# Altium footprint library Package_DFN_QFN.PcbLib: 735 footprints (part 37 of 46)
Each footprint in its own frame and in the unit in brackets; x right, y up, seen from the top. Pads: shape width x height; smd on the part's side, far side on the other; paste and mask are expansions set on the pad; w line width, h text height; cw(c..) or ccw(c..) is an arc to the next point about the centre after c.
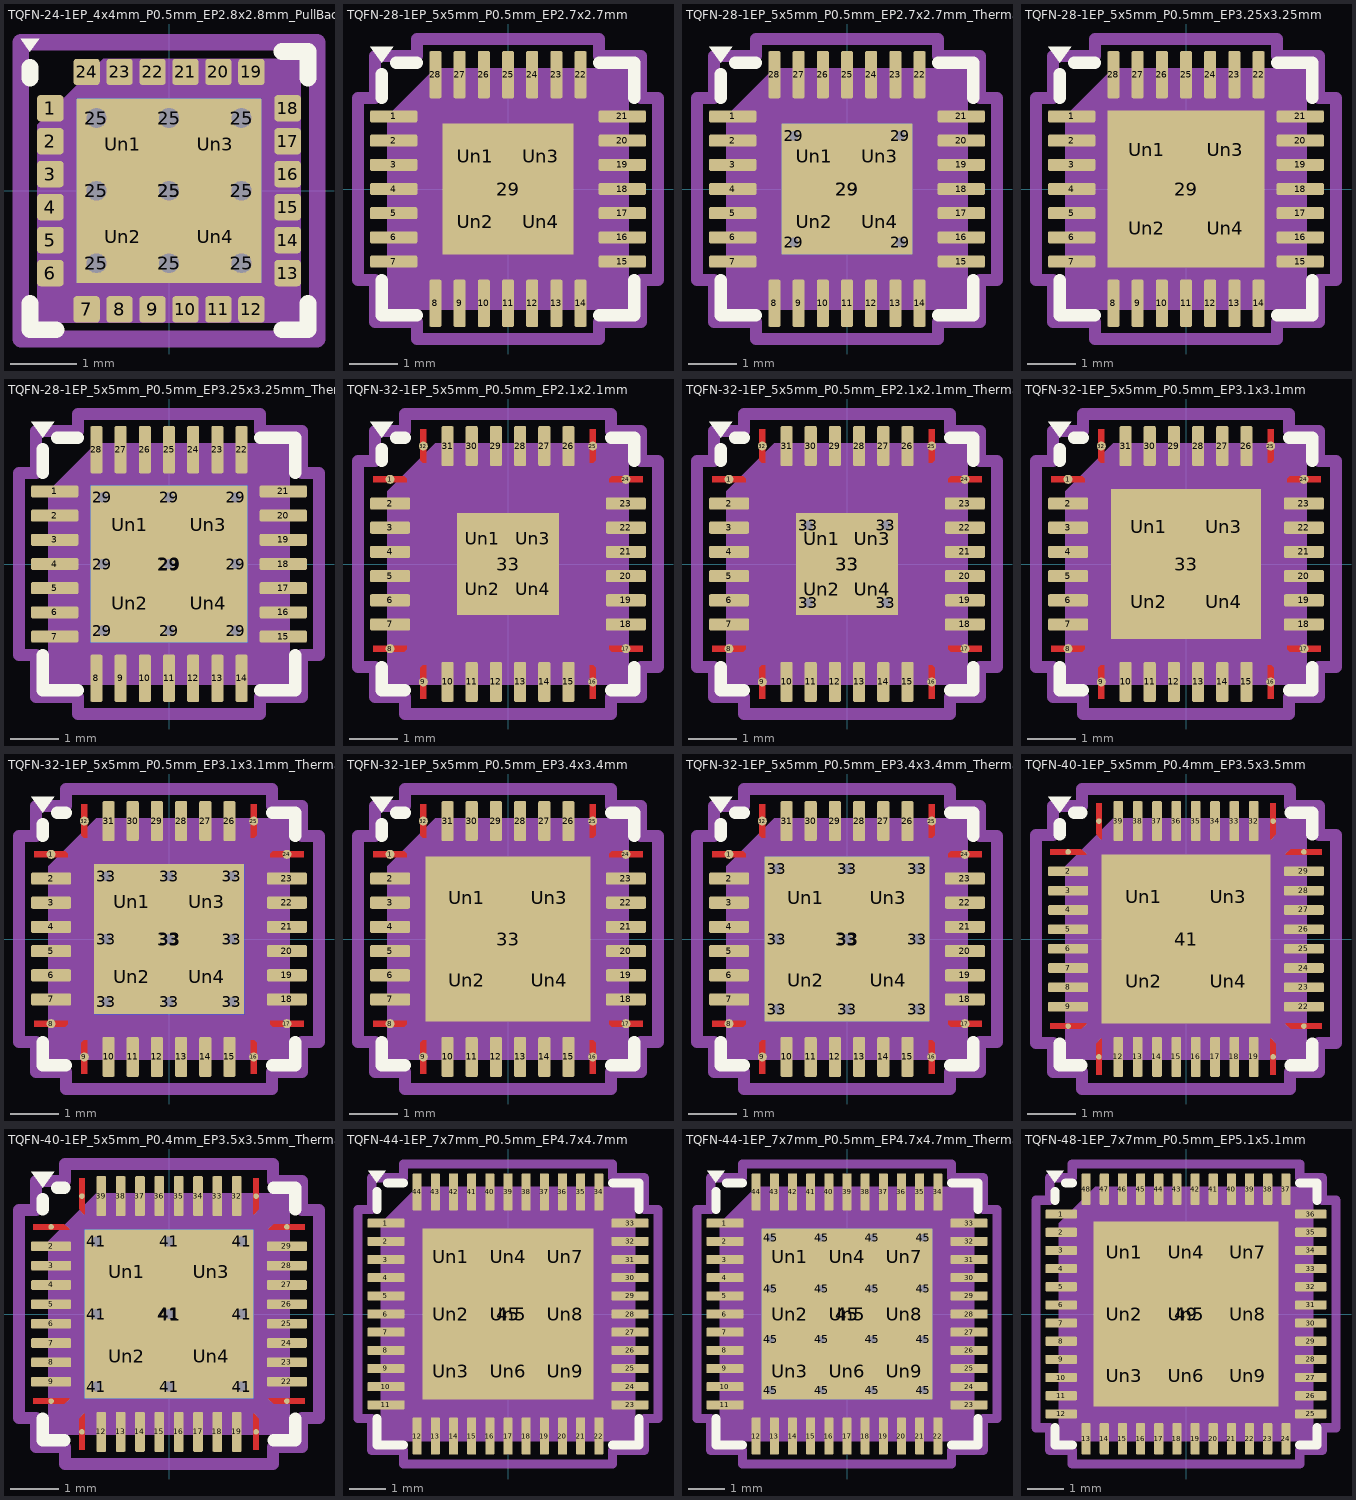
[diagram p36: the footprints below, top view; thin cyan lines are the x and y axes]

## TQFN-24-1EP_4x4mm_P0.5mm_EP2.8x2.8mm_PullBack_ThermalVias [mm] "TQFN-24-1EP_4x4mm_P0.5mm_EP2.8x2.8mm_PullBack_ThermalVias"
pads (39):
  rrect25% 0.4x0.4 smd: 1(-1.8,1.25) 2(-1.8,0.75) 3(-1.8,0.25) 4(-1.8,-0.25) 5(-1.8,-0.75) 6(-1.8,-1.25) 7(-1.25,-1.8) 8(-0.75,-1.8) 9(-0.25,-1.8) 10(0.25,-1.8) 11(0.75,-1.8) 12(1.25,-1.8) 13(1.8,-1.25) 14(1.8,-0.75) 15(1.8,-0.25) 16(1.8,0.25) 17(1.8,0.75) 18(1.8,1.25) 19(1.25,1.8) 20(0.75,1.8) 21(0.25,1.8) 22(-0.25,1.8) 23(-0.75,1.8) 24(-1.25,1.8)
  round 0.6 hole 0.3: 25(-1.1,-1.1) 25(-1.1,0) 25(-1.1,1.1) 25(0,-1.1) 25(0,0) 25(0,1.1) 25(1.1,-1.1) 25(1.1,0) 25(1.1,1.1)
  rect 2.8x2.8 smd: 25(0,0)
  rect 2.8x2.8 smd far side: 25(0,0)
  rrect22% 1.13x1.13 on Top Paste: Un1(-0.7,0.7) Un2(-0.7,-0.7) Un3(0.7,0.7) Un4(0.7,-0.7)
F.SilkS:
  region: -2.11,2.11 -2.25,2.3 -1.97,2.3
  lines w0.254: -2.11,-1.71 -2.11,-2.11 -1.71,-2.11 ; -2.11,1.71 -2.11,1.87 ; 1.71,-2.11 2.11,-2.11 2.11,-1.71 ; 1.71,2.11 2.11,2.11 2.11,1.71
Top Component Center:
  lines w0.127: -0.127,0 0.127,0 -0.127,0 ; 0,-0.127 0,0.127 0,-0.127
Top Assembly:
  region: 2,-2 -2,-2 -2,1 -1,2 2,2
Top Courtyard:
  lines w0.254: -2.25,-2.25 2.25,-2.25 2.25,2.25 -2.25,2.25 -2.25,-2.25
Top Designator:
  text ".Designator" at -3.43,-0.344 h1.52

## TQFN-28-1EP_5x5mm_P0.5mm_EP2.7x2.7mm [mm] "TQFN-28-1EP_5x5mm_P0.5mm_EP2.7x2.7mm"
pads (33):
  rrect25% 0.975x0.25 smd: 1(-2.362,1.5) 2(-2.362,1) 3(-2.362,0.5) 4(-2.362,0) 5(-2.362,-0.5) 6(-2.362,-1) 7(-2.362,-1.5) 15(2.362,-1.5) 16(2.362,-1) 17(2.362,-0.5) 18(2.362,0) 19(2.362,0.5) 20(2.362,1) 21(2.362,1.5)
  rrect25% 0.25x0.975 smd: 8(-1.5,-2.362) 9(-1,-2.362) 10(-0.5,-2.362) 11(0,-2.362) 12(0.5,-2.362) 13(1,-2.362) 14(1.5,-2.362) 22(1.5,2.362) 23(1,2.362) 24(0.5,2.362) 25(0,2.362) 26(-0.5,2.362) 27(-1,2.362) 28(-1.5,2.362)
  rect 2.7x2.7 smd: 29(0,0)
  rrect23% 1.09x1.09 on Top Paste: Un1(-0.675,0.675) Un2(-0.675,-0.675) Un3(0.675,0.675) Un4(0.675,-0.675)
F.SilkS:
  region: -2.61,2.61 -2.85,2.94 -2.37,2.94
  lines w0.254: -2.61,-1.885 -2.61,-2.61 -1.885,-2.61 ; -2.61,1.885 -2.61,2.37 ; -2.31,2.61 -1.885,2.61 ; 1.885,-2.61 2.61,-2.61 2.61,-1.885 ; 1.885,2.61 2.61,2.61 2.61,1.885
Top Component Center:
  lines w0.127: -0.127,0 0.127,0 -0.127,0 ; 0,-0.127 0,0.127 0,-0.127
Top Assembly:
  region: 2.5,-2.5 -2.5,-2.5 -2.5,1.5 -1.5,2.5 2.5,2.5
Top Courtyard:
  lines w0.254: -3.1,-1.88 -2.75,-1.88 -2.75,-2.75 -1.88,-2.75 -1.88,-3.1 1.88,-3.1 1.88,-2.75 2.75,-2.75 2.75,-1.88 3.1,-1.88 3.1,1.88 2.75,1.88 2.75,2.75 1.88,2.75 1.88,3.1 -1.88,3.1 -1.88,2.75 -2.75,2.75 -2.75,1.88 -3.1,1.88 -3.1,-1.88
Top Designator:
  text ".Designator" at -3.43,-0.344 h1.52

## TQFN-28-1EP_5x5mm_P0.5mm_EP2.7x2.7mm_ThermalVias [mm] "TQFN-28-1EP_5x5mm_P0.5mm_EP2.7x2.7mm_ThermalVias"
pads (38):
  rrect25% 0.975x0.25 smd: 1(-2.362,1.5) 2(-2.362,1) 3(-2.362,0.5) 4(-2.362,0) 5(-2.362,-0.5) 6(-2.362,-1) 7(-2.362,-1.5) 15(2.362,-1.5) 16(2.362,-1) 17(2.362,-0.5) 18(2.362,0) 19(2.362,0.5) 20(2.362,1) 21(2.362,1.5)
  rrect25% 0.25x0.975 smd: 8(-1.5,-2.362) 9(-1,-2.362) 10(-0.5,-2.362) 11(0,-2.362) 12(0.5,-2.362) 13(1,-2.362) 14(1.5,-2.362) 22(1.5,2.362) 23(1,2.362) 24(0.5,2.362) 25(0,2.362) 26(-0.5,2.362) 27(-1,2.362) 28(-1.5,2.362)
  round 0.5 hole 0.2: 29(-1.1,-1.1) 29(-1.1,1.1) 29(1.1,-1.1) 29(1.1,1.1)
  rect 2.7x2.7 smd: 29(0,0)
  rect 2.7x2.7 smd far side: 29(0,0)
  rrect21% 1.17x1.17 on Top Paste: Un1(-0.675,0.675) Un2(-0.675,-0.675) Un3(0.675,0.675) Un4(0.675,-0.675)
F.SilkS:
  region: -2.61,2.61 -2.85,2.94 -2.37,2.94
  lines w0.254: -2.61,-1.885 -2.61,-2.61 -1.885,-2.61 ; -2.61,1.885 -2.61,2.37 ; -2.31,2.61 -1.885,2.61 ; 1.885,-2.61 2.61,-2.61 2.61,-1.885 ; 1.885,2.61 2.61,2.61 2.61,1.885
Top Component Center:
  lines w0.127: -0.127,0 0.127,0 -0.127,0 ; 0,-0.127 0,0.127 0,-0.127
Top Assembly:
  region: 2.5,-2.5 -2.5,-2.5 -2.5,1.5 -1.5,2.5 2.5,2.5
Top Courtyard:
  lines w0.254: -3.1,-1.88 -2.75,-1.88 -2.75,-2.75 -1.88,-2.75 -1.88,-3.1 1.88,-3.1 1.88,-2.75 2.75,-2.75 2.75,-1.88 3.1,-1.88 3.1,1.88 2.75,1.88 2.75,2.75 1.88,2.75 1.88,3.1 -1.88,3.1 -1.88,2.75 -2.75,2.75 -2.75,1.88 -3.1,1.88 -3.1,-1.88
Top Designator:
  text ".Designator" at -3.43,-0.344 h1.52

## TQFN-28-1EP_5x5mm_P0.5mm_EP3.25x3.25mm [mm] "TQFN-28-1EP_5x5mm_P0.5mm_EP3.25x3.25mm"
pads (33):
  rrect25% 0.975x0.25 smd: 1(-2.362,1.5) 2(-2.362,1) 3(-2.362,0.5) 4(-2.362,0) 5(-2.362,-0.5) 6(-2.362,-1) 7(-2.362,-1.5) 15(2.362,-1.5) 16(2.362,-1) 17(2.362,-0.5) 18(2.362,0) 19(2.362,0.5) 20(2.362,1) 21(2.362,1.5)
  rrect25% 0.25x0.975 smd: 8(-1.5,-2.362) 9(-1,-2.362) 10(-0.5,-2.362) 11(0,-2.362) 12(0.5,-2.362) 13(1,-2.362) 14(1.5,-2.362) 22(1.5,2.362) 23(1,2.362) 24(0.5,2.362) 25(0,2.362) 26(-0.5,2.362) 27(-1,2.362) 28(-1.5,2.362)
  rect 3.25x3.25 smd: 29(0,0)
  rrect19% 1.31x1.31 on Top Paste: Un1(-0.81,0.81) Un2(-0.81,-0.81) Un3(0.81,0.81) Un4(0.81,-0.81)
F.SilkS:
  region: -2.61,2.61 -2.85,2.94 -2.37,2.94
  lines w0.254: -2.61,-1.885 -2.61,-2.61 -1.885,-2.61 ; -2.61,1.885 -2.61,2.37 ; -2.31,2.61 -1.885,2.61 ; 1.885,-2.61 2.61,-2.61 2.61,-1.885 ; 1.885,2.61 2.61,2.61 2.61,1.885
Top Component Center:
  lines w0.127: -0.127,0 0.127,0 -0.127,0 ; 0,-0.127 0,0.127 0,-0.127
Top Assembly:
  region: 2.5,-2.5 -2.5,-2.5 -2.5,1.5 -1.5,2.5 2.5,2.5
Top Courtyard:
  lines w0.254: -3.1,-1.88 -2.75,-1.88 -2.75,-2.75 -1.88,-2.75 -1.88,-3.1 1.88,-3.1 1.88,-2.75 2.75,-2.75 2.75,-1.88 3.1,-1.88 3.1,1.88 2.75,1.88 2.75,2.75 1.88,2.75 1.88,3.1 -1.88,3.1 -1.88,2.75 -2.75,2.75 -2.75,1.88 -3.1,1.88 -3.1,-1.88
Top Designator:
  text ".Designator" at -3.43,-0.344 h1.52

## TQFN-28-1EP_5x5mm_P0.5mm_EP3.25x3.25mm_ThermalVias [mm] "TQFN-28-1EP_5x5mm_P0.5mm_EP3.25x3.25mm_ThermalVias"
pads (43):
  rrect25% 0.975x0.25 smd: 1(-2.362,1.5) 2(-2.362,1) 3(-2.362,0.5) 4(-2.362,0) 5(-2.362,-0.5) 6(-2.362,-1) 7(-2.362,-1.5) 15(2.362,-1.5) 16(2.362,-1) 17(2.362,-0.5) 18(2.362,0) 19(2.362,0.5) 20(2.362,1) 21(2.362,1.5)
  rrect25% 0.25x0.975 smd: 8(-1.5,-2.362) 9(-1,-2.362) 10(-0.5,-2.362) 11(0,-2.362) 12(0.5,-2.362) 13(1,-2.362) 14(1.5,-2.362) 22(1.5,2.362) 23(1,2.362) 24(0.5,2.362) 25(0,2.362) 26(-0.5,2.362) 27(-1,2.362) 28(-1.5,2.362)
  round 0.5 hole 0.2: 29(-1.375,-1.375) 29(-1.375,0) 29(-1.375,1.375) 29(0,-1.375) 29(0,0) 29(0,1.375) 29(1.375,-1.375) 29(1.375,0) 29(1.375,1.375)
  rect 3.25x3.25 smd: 29(0,0)
  rect 3.25x3.25 smd far side: 29(0,0)
  rrect18% 1.41x1.41 on Top Paste: Un1(-0.81,0.81) Un2(-0.81,-0.81) Un3(0.81,0.81) Un4(0.81,-0.81)
F.SilkS:
  region: -2.61,2.61 -2.85,2.94 -2.37,2.94
  lines w0.254: -2.61,-1.885 -2.61,-2.61 -1.885,-2.61 ; -2.61,1.885 -2.61,2.37 ; -2.31,2.61 -1.885,2.61 ; 1.885,-2.61 2.61,-2.61 2.61,-1.885 ; 1.885,2.61 2.61,2.61 2.61,1.885
Top Component Center:
  lines w0.127: -0.127,0 0.127,0 -0.127,0 ; 0,-0.127 0,0.127 0,-0.127
Top Assembly:
  region: 2.5,-2.5 -2.5,-2.5 -2.5,1.5 -1.5,2.5 2.5,2.5
Top Courtyard:
  lines w0.254: -3.1,-1.88 -2.75,-1.88 -2.75,-2.75 -1.88,-2.75 -1.88,-3.1 1.88,-3.1 1.88,-2.75 2.75,-2.75 2.75,-1.88 3.1,-1.88 3.1,1.88 2.75,1.88 2.75,2.75 1.88,2.75 1.88,3.1 -1.88,3.1 -1.88,2.75 -2.75,2.75 -2.75,1.88 -3.1,1.88 -3.1,-1.88
Top Designator:
  text ".Designator" at -3.43,-0.344 h1.52

## TQFN-32-1EP_5x5mm_P0.5mm_EP2.1x2.1mm [mm] "TQFN-32-1EP_5x5mm_P0.5mm_EP2.1x2.1mm"
pads (37):
  round 0.186 smd: 1(-2.438,1.75) 8(-2.438,-1.75) 9(-1.75,-2.438) 16(1.75,-2.438) 17(2.438,-1.75) 24(2.438,1.75) 25(1.75,2.438) 32(-1.75,2.438)
  rrect25% 0.825x0.25 smd: 2(-2.438,1.25) 3(-2.438,0.75) 4(-2.438,0.25) 5(-2.438,-0.25) 6(-2.438,-0.75) 7(-2.438,-1.25) 18(2.438,-1.25) 19(2.438,-0.75) 20(2.438,-0.25) 21(2.438,0.25) 22(2.438,0.75) 23(2.438,1.25)
  rrect25% 0.25x0.825 smd: 10(-1.25,-2.438) 11(-0.75,-2.438) 12(-0.25,-2.438) 13(0.25,-2.438) 14(0.75,-2.438) 15(1.25,-2.438) 26(1.25,2.438) 27(0.75,2.438) 28(0.25,2.438) 29(-0.25,2.438) 30(-0.75,2.438) 31(-1.25,2.438)
  rect 2.1x2.1 smd: 33(0,0)
  rrect25% 0.85x0.85 on Top Paste: Un1(-0.525,0.525) Un2(-0.525,-0.525) Un3(0.525,0.525) Un4(0.525,-0.525)
F.Cu:
  region: -1.687,2.088 -1.759,2.088 -1.812,2.141 -1.812,2.788 -1.687,2.788
  region: 1.812,2.141 1.759,2.088 1.687,2.088 1.687,2.788 1.812,2.788
  region: 2.788,1.687 2.088,1.687 2.088,1.759 2.141,1.812 2.788,1.812
  region: 2.788,-1.812 2.141,-1.812 2.088,-1.759 2.088,-1.687 2.788,-1.687
  region: 1.812,-2.141 1.812,-2.788 1.687,-2.788 1.687,-2.088 1.759,-2.088
  region: -1.687,-2.788 -1.812,-2.788 -1.812,-2.141 -1.759,-2.088 -1.687,-2.088
  region: -2.088,-1.759 -2.141,-1.812 -2.788,-1.812 -2.788,-1.687 -2.088,-1.687
  region: -2.088,1.759 -2.088,1.687 -2.788,1.687 -2.788,1.812 -2.141,1.812
F.SilkS:
  region: -2.61,2.61 -2.85,2.94 -2.37,2.94
  lines w0.254: -2.61,-2.135 -2.61,-2.61 -2.135,-2.61 ; -2.61,2.135 -2.61,2.37 ; -2.31,2.61 -2.135,2.61 ; 2.135,-2.61 2.61,-2.61 2.61,-2.135 ; 2.135,2.61 2.61,2.61 2.61,2.135
F.Paste:
  region: -1.687,2.088 -1.759,2.088 -1.812,2.141 -1.812,2.788 -1.687,2.788
  region: 1.812,2.141 1.759,2.088 1.687,2.088 1.687,2.788 1.812,2.788
  region: 2.788,1.687 2.088,1.687 2.088,1.759 2.141,1.812 2.788,1.812
  region: 2.788,-1.812 2.141,-1.812 2.088,-1.759 2.088,-1.687 2.788,-1.687
  region: 1.812,-2.141 1.812,-2.788 1.687,-2.788 1.687,-2.088 1.759,-2.088
  region: -1.687,-2.788 -1.812,-2.788 -1.812,-2.141 -1.759,-2.088 -1.687,-2.088
  region: -2.088,-1.759 -2.141,-1.812 -2.788,-1.812 -2.788,-1.687 -2.088,-1.687
  region: -2.088,1.759 -2.088,1.687 -2.788,1.687 -2.788,1.812 -2.141,1.812
F.Mask:
  region: -1.687,2.088 -1.759,2.088 -1.812,2.141 -1.812,2.788 -1.687,2.788
  region: 1.812,2.141 1.759,2.088 1.687,2.088 1.687,2.788 1.812,2.788
  region: 2.788,1.687 2.088,1.687 2.088,1.759 2.141,1.812 2.788,1.812
  region: 2.788,-1.812 2.141,-1.812 2.088,-1.759 2.088,-1.687 2.788,-1.687
  region: 1.812,-2.141 1.812,-2.788 1.687,-2.788 1.687,-2.088 1.759,-2.088
  region: -1.687,-2.788 -1.812,-2.788 -1.812,-2.141 -1.759,-2.088 -1.687,-2.088
  region: -2.088,-1.759 -2.141,-1.812 -2.788,-1.812 -2.788,-1.687 -2.088,-1.687
  region: -2.088,1.759 -2.088,1.687 -2.788,1.687 -2.788,1.812 -2.141,1.812
Top Component Center:
  lines w0.127: -0.127,0 0.127,0 -0.127,0 ; 0,-0.127 0,0.127 0,-0.127
Top Assembly:
  region: 2.5,-2.5 -2.5,-2.5 -2.5,1.5 -1.5,2.5 2.5,2.5
Top Courtyard:
  lines w0.254: -3.1,-2.13 -2.75,-2.13 -2.75,-2.75 -2.13,-2.75 -2.13,-3.1 2.13,-3.1 2.13,-2.75 2.75,-2.75 2.75,-2.13 3.1,-2.13 3.1,2.13 2.75,2.13 2.75,2.75 2.13,2.75 2.13,3.1 -2.13,3.1 -2.13,2.75 -2.75,2.75 -2.75,2.13 -3.1,2.13 -3.1,-2.13
Top Designator:
  text ".Designator" at -3.43,-0.344 h1.52

## TQFN-32-1EP_5x5mm_P0.5mm_EP2.1x2.1mm_ThermalVias [mm] "TQFN-32-1EP_5x5mm_P0.5mm_EP2.1x2.1mm_ThermalVias"
pads (42):
  round 0.186 smd: 1(-2.438,1.75) 8(-2.438,-1.75) 9(-1.75,-2.438) 16(1.75,-2.438) 17(2.438,-1.75) 24(2.438,1.75) 25(1.75,2.438) 32(-1.75,2.438)
  rrect25% 0.825x0.25 smd: 2(-2.438,1.25) 3(-2.438,0.75) 4(-2.438,0.25) 5(-2.438,-0.25) 6(-2.438,-0.75) 7(-2.438,-1.25) 18(2.438,-1.25) 19(2.438,-0.75) 20(2.438,-0.25) 21(2.438,0.25) 22(2.438,0.75) 23(2.438,1.25)
  rrect25% 0.25x0.825 smd: 10(-1.25,-2.438) 11(-0.75,-2.438) 12(-0.25,-2.438) 13(0.25,-2.438) 14(0.75,-2.438) 15(1.25,-2.438) 26(1.25,2.438) 27(0.75,2.438) 28(0.25,2.438) 29(-0.25,2.438) 30(-0.75,2.438) 31(-1.25,2.438)
  round 0.5 hole 0.2: 33(-0.8,-0.8) 33(-0.8,0.8) 33(0.8,-0.8) 33(0.8,0.8)
  rect 2.1x2.1 smd: 33(0,0)
  rect 2.1x2.1 smd far side: 33(0,0)
  rrect25% 0.91x0.91 on Top Paste: Un1(-0.525,0.525) Un2(-0.525,-0.525) Un3(0.525,0.525) Un4(0.525,-0.525)
F.Cu:
  region: -1.687,2.088 -1.759,2.088 -1.812,2.141 -1.812,2.788 -1.687,2.788
  region: 1.812,2.141 1.759,2.088 1.687,2.088 1.687,2.788 1.812,2.788
  region: 2.788,1.687 2.088,1.687 2.088,1.759 2.141,1.812 2.788,1.812
  region: 2.788,-1.812 2.141,-1.812 2.088,-1.759 2.088,-1.687 2.788,-1.687
  region: 1.812,-2.141 1.812,-2.788 1.687,-2.788 1.687,-2.088 1.759,-2.088
  region: -1.687,-2.788 -1.812,-2.788 -1.812,-2.141 -1.759,-2.088 -1.687,-2.088
  region: -2.088,-1.759 -2.141,-1.812 -2.788,-1.812 -2.788,-1.687 -2.088,-1.687
  region: -2.088,1.759 -2.088,1.687 -2.788,1.687 -2.788,1.812 -2.141,1.812
F.SilkS:
  region: -2.61,2.61 -2.85,2.94 -2.37,2.94
  lines w0.254: -2.61,-2.135 -2.61,-2.61 -2.135,-2.61 ; -2.61,2.135 -2.61,2.37 ; -2.31,2.61 -2.135,2.61 ; 2.135,-2.61 2.61,-2.61 2.61,-2.135 ; 2.135,2.61 2.61,2.61 2.61,2.135
F.Paste:
  region: -1.687,2.088 -1.759,2.088 -1.812,2.141 -1.812,2.788 -1.687,2.788
  region: 1.812,2.141 1.759,2.088 1.687,2.088 1.687,2.788 1.812,2.788
  region: 2.788,1.687 2.088,1.687 2.088,1.759 2.141,1.812 2.788,1.812
  region: 2.788,-1.812 2.141,-1.812 2.088,-1.759 2.088,-1.687 2.788,-1.687
  region: 1.812,-2.141 1.812,-2.788 1.687,-2.788 1.687,-2.088 1.759,-2.088
  region: -1.687,-2.788 -1.812,-2.788 -1.812,-2.141 -1.759,-2.088 -1.687,-2.088
  region: -2.088,-1.759 -2.141,-1.812 -2.788,-1.812 -2.788,-1.687 -2.088,-1.687
  region: -2.088,1.759 -2.088,1.687 -2.788,1.687 -2.788,1.812 -2.141,1.812
F.Mask:
  region: -1.687,2.088 -1.759,2.088 -1.812,2.141 -1.812,2.788 -1.687,2.788
  region: 1.812,2.141 1.759,2.088 1.687,2.088 1.687,2.788 1.812,2.788
  region: 2.788,1.687 2.088,1.687 2.088,1.759 2.141,1.812 2.788,1.812
  region: 2.788,-1.812 2.141,-1.812 2.088,-1.759 2.088,-1.687 2.788,-1.687
  region: 1.812,-2.141 1.812,-2.788 1.687,-2.788 1.687,-2.088 1.759,-2.088
  region: -1.687,-2.788 -1.812,-2.788 -1.812,-2.141 -1.759,-2.088 -1.687,-2.088
  region: -2.088,-1.759 -2.141,-1.812 -2.788,-1.812 -2.788,-1.687 -2.088,-1.687
  region: -2.088,1.759 -2.088,1.687 -2.788,1.687 -2.788,1.812 -2.141,1.812
Top Component Center:
  lines w0.127: -0.127,0 0.127,0 -0.127,0 ; 0,-0.127 0,0.127 0,-0.127
Top Assembly:
  region: 2.5,-2.5 -2.5,-2.5 -2.5,1.5 -1.5,2.5 2.5,2.5
Top Courtyard:
  lines w0.254: -3.1,-2.13 -2.75,-2.13 -2.75,-2.75 -2.13,-2.75 -2.13,-3.1 2.13,-3.1 2.13,-2.75 2.75,-2.75 2.75,-2.13 3.1,-2.13 3.1,2.13 2.75,2.13 2.75,2.75 2.13,2.75 2.13,3.1 -2.13,3.1 -2.13,2.75 -2.75,2.75 -2.75,2.13 -3.1,2.13 -3.1,-2.13
Top Designator:
  text ".Designator" at -3.43,-0.344 h1.52

## TQFN-32-1EP_5x5mm_P0.5mm_EP3.1x3.1mm [mm] "TQFN-32-1EP_5x5mm_P0.5mm_EP3.1x3.1mm"
pads (37):
  round 0.186 smd: 1(-2.438,1.75) 8(-2.438,-1.75) 9(-1.75,-2.438) 16(1.75,-2.438) 17(2.438,-1.75) 24(2.438,1.75) 25(1.75,2.438) 32(-1.75,2.438)
  rrect25% 0.825x0.25 smd: 2(-2.438,1.25) 3(-2.438,0.75) 4(-2.438,0.25) 5(-2.438,-0.25) 6(-2.438,-0.75) 7(-2.438,-1.25) 18(2.438,-1.25) 19(2.438,-0.75) 20(2.438,-0.25) 21(2.438,0.25) 22(2.438,0.75) 23(2.438,1.25)
  rrect25% 0.25x0.825 smd: 10(-1.25,-2.438) 11(-0.75,-2.438) 12(-0.25,-2.438) 13(0.25,-2.438) 14(0.75,-2.438) 15(1.25,-2.438) 26(1.25,2.438) 27(0.75,2.438) 28(0.25,2.438) 29(-0.25,2.438) 30(-0.75,2.438) 31(-1.25,2.438)
  rect 3.1x3.1 smd: 33(0,0)
  rrect20% 1.25x1.25 on Top Paste: Un1(-0.775,0.775) Un2(-0.775,-0.775) Un3(0.775,0.775) Un4(0.775,-0.775)
F.Cu:
  region: -1.687,2.088 -1.759,2.088 -1.812,2.141 -1.812,2.788 -1.687,2.788
  region: 1.812,2.141 1.759,2.088 1.687,2.088 1.687,2.788 1.812,2.788
  region: 2.788,1.687 2.088,1.687 2.088,1.759 2.141,1.812 2.788,1.812
  region: 2.788,-1.812 2.141,-1.812 2.088,-1.759 2.088,-1.687 2.788,-1.687
  region: 1.812,-2.141 1.812,-2.788 1.687,-2.788 1.687,-2.088 1.759,-2.088
  region: -1.687,-2.788 -1.812,-2.788 -1.812,-2.141 -1.759,-2.088 -1.687,-2.088
  region: -2.088,-1.759 -2.141,-1.812 -2.788,-1.812 -2.788,-1.687 -2.088,-1.687
  region: -2.088,1.759 -2.088,1.687 -2.788,1.687 -2.788,1.812 -2.141,1.812
F.SilkS:
  region: -2.61,2.61 -2.85,2.94 -2.37,2.94
  lines w0.254: -2.61,-2.135 -2.61,-2.61 -2.135,-2.61 ; -2.61,2.135 -2.61,2.37 ; -2.31,2.61 -2.135,2.61 ; 2.135,-2.61 2.61,-2.61 2.61,-2.135 ; 2.135,2.61 2.61,2.61 2.61,2.135
F.Paste:
  region: -1.687,2.088 -1.759,2.088 -1.812,2.141 -1.812,2.788 -1.687,2.788
  region: 1.812,2.141 1.759,2.088 1.687,2.088 1.687,2.788 1.812,2.788
  region: 2.788,1.687 2.088,1.687 2.088,1.759 2.141,1.812 2.788,1.812
  region: 2.788,-1.812 2.141,-1.812 2.088,-1.759 2.088,-1.687 2.788,-1.687
  region: 1.812,-2.141 1.812,-2.788 1.687,-2.788 1.687,-2.088 1.759,-2.088
  region: -1.687,-2.788 -1.812,-2.788 -1.812,-2.141 -1.759,-2.088 -1.687,-2.088
  region: -2.088,-1.759 -2.141,-1.812 -2.788,-1.812 -2.788,-1.687 -2.088,-1.687
  region: -2.088,1.759 -2.088,1.687 -2.788,1.687 -2.788,1.812 -2.141,1.812
F.Mask:
  region: -1.687,2.088 -1.759,2.088 -1.812,2.141 -1.812,2.788 -1.687,2.788
  region: 1.812,2.141 1.759,2.088 1.687,2.088 1.687,2.788 1.812,2.788
  region: 2.788,1.687 2.088,1.687 2.088,1.759 2.141,1.812 2.788,1.812
  region: 2.788,-1.812 2.141,-1.812 2.088,-1.759 2.088,-1.687 2.788,-1.687
  region: 1.812,-2.141 1.812,-2.788 1.687,-2.788 1.687,-2.088 1.759,-2.088
  region: -1.687,-2.788 -1.812,-2.788 -1.812,-2.141 -1.759,-2.088 -1.687,-2.088
  region: -2.088,-1.759 -2.141,-1.812 -2.788,-1.812 -2.788,-1.687 -2.088,-1.687
  region: -2.088,1.759 -2.088,1.687 -2.788,1.687 -2.788,1.812 -2.141,1.812
Top Component Center:
  lines w0.127: -0.127,0 0.127,0 -0.127,0 ; 0,-0.127 0,0.127 0,-0.127
Top Assembly:
  region: 2.5,-2.5 -2.5,-2.5 -2.5,1.5 -1.5,2.5 2.5,2.5
Top Courtyard:
  lines w0.254: -3.1,-2.13 -2.75,-2.13 -2.75,-2.75 -2.13,-2.75 -2.13,-3.1 2.13,-3.1 2.13,-2.75 2.75,-2.75 2.75,-2.13 3.1,-2.13 3.1,2.13 2.75,2.13 2.75,2.75 2.13,2.75 2.13,3.1 -2.13,3.1 -2.13,2.75 -2.75,2.75 -2.75,2.13 -3.1,2.13 -3.1,-2.13
Top Designator:
  text ".Designator" at -3.43,-0.344 h1.52

## TQFN-32-1EP_5x5mm_P0.5mm_EP3.1x3.1mm_ThermalVias [mm] "TQFN-32-1EP_5x5mm_P0.5mm_EP3.1x3.1mm_ThermalVias"
pads (47):
  round 0.186 smd: 1(-2.438,1.75) 8(-2.438,-1.75) 9(-1.75,-2.438) 16(1.75,-2.438) 17(2.438,-1.75) 24(2.438,1.75) 25(1.75,2.438) 32(-1.75,2.438)
  rrect25% 0.825x0.25 smd: 2(-2.438,1.25) 3(-2.438,0.75) 4(-2.438,0.25) 5(-2.438,-0.25) 6(-2.438,-0.75) 7(-2.438,-1.25) 18(2.438,-1.25) 19(2.438,-0.75) 20(2.438,-0.25) 21(2.438,0.25) 22(2.438,0.75) 23(2.438,1.25)
  rrect25% 0.25x0.825 smd: 10(-1.25,-2.438) 11(-0.75,-2.438) 12(-0.25,-2.438) 13(0.25,-2.438) 14(0.75,-2.438) 15(1.25,-2.438) 26(1.25,2.438) 27(0.75,2.438) 28(0.25,2.438) 29(-0.25,2.438) 30(-0.75,2.438) 31(-1.25,2.438)
  round 0.5 hole 0.2: 33(-1.3,-1.3) 33(-1.3,0) 33(-1.3,1.3) 33(0,-1.3) 33(0,0) 33(0,1.3) 33(1.3,-1.3) 33(1.3,0) 33(1.3,1.3)
  rect 3.1x3.1 smd: 33(0,0)
  rect 3.1x3.1 smd far side: 33(0,0)
  rrect19% 1.34x1.34 on Top Paste: Un1(-0.775,0.775) Un2(-0.775,-0.775) Un3(0.775,0.775) Un4(0.775,-0.775)
F.Cu:
  region: -1.687,2.088 -1.759,2.088 -1.812,2.141 -1.812,2.788 -1.687,2.788
  region: 1.812,2.141 1.759,2.088 1.687,2.088 1.687,2.788 1.812,2.788
  region: 2.788,1.687 2.088,1.687 2.088,1.759 2.141,1.812 2.788,1.812
  region: 2.788,-1.812 2.141,-1.812 2.088,-1.759 2.088,-1.687 2.788,-1.687
  region: 1.812,-2.141 1.812,-2.788 1.687,-2.788 1.687,-2.088 1.759,-2.088
  region: -1.687,-2.788 -1.812,-2.788 -1.812,-2.141 -1.759,-2.088 -1.687,-2.088
  region: -2.088,-1.759 -2.141,-1.812 -2.788,-1.812 -2.788,-1.687 -2.088,-1.687
  region: -2.088,1.759 -2.088,1.687 -2.788,1.687 -2.788,1.812 -2.141,1.812
F.SilkS:
  region: -2.61,2.61 -2.85,2.94 -2.37,2.94
  lines w0.254: -2.61,-2.135 -2.61,-2.61 -2.135,-2.61 ; -2.61,2.135 -2.61,2.37 ; -2.31,2.61 -2.135,2.61 ; 2.135,-2.61 2.61,-2.61 2.61,-2.135 ; 2.135,2.61 2.61,2.61 2.61,2.135
F.Paste:
  region: -1.687,2.088 -1.759,2.088 -1.812,2.141 -1.812,2.788 -1.687,2.788
  region: 1.812,2.141 1.759,2.088 1.687,2.088 1.687,2.788 1.812,2.788
  region: 2.788,1.687 2.088,1.687 2.088,1.759 2.141,1.812 2.788,1.812
  region: 2.788,-1.812 2.141,-1.812 2.088,-1.759 2.088,-1.687 2.788,-1.687
  region: 1.812,-2.141 1.812,-2.788 1.687,-2.788 1.687,-2.088 1.759,-2.088
  region: -1.687,-2.788 -1.812,-2.788 -1.812,-2.141 -1.759,-2.088 -1.687,-2.088
  region: -2.088,-1.759 -2.141,-1.812 -2.788,-1.812 -2.788,-1.687 -2.088,-1.687
  region: -2.088,1.759 -2.088,1.687 -2.788,1.687 -2.788,1.812 -2.141,1.812
F.Mask:
  region: -1.687,2.088 -1.759,2.088 -1.812,2.141 -1.812,2.788 -1.687,2.788
  region: 1.812,2.141 1.759,2.088 1.687,2.088 1.687,2.788 1.812,2.788
  region: 2.788,1.687 2.088,1.687 2.088,1.759 2.141,1.812 2.788,1.812
  region: 2.788,-1.812 2.141,-1.812 2.088,-1.759 2.088,-1.687 2.788,-1.687
  region: 1.812,-2.141 1.812,-2.788 1.687,-2.788 1.687,-2.088 1.759,-2.088
  region: -1.687,-2.788 -1.812,-2.788 -1.812,-2.141 -1.759,-2.088 -1.687,-2.088
  region: -2.088,-1.759 -2.141,-1.812 -2.788,-1.812 -2.788,-1.687 -2.088,-1.687
  region: -2.088,1.759 -2.088,1.687 -2.788,1.687 -2.788,1.812 -2.141,1.812
Top Component Center:
  lines w0.127: -0.127,0 0.127,0 -0.127,0 ; 0,-0.127 0,0.127 0,-0.127
Top Assembly:
  region: 2.5,-2.5 -2.5,-2.5 -2.5,1.5 -1.5,2.5 2.5,2.5
Top Courtyard:
  lines w0.254: -3.1,-2.13 -2.75,-2.13 -2.75,-2.75 -2.13,-2.75 -2.13,-3.1 2.13,-3.1 2.13,-2.75 2.75,-2.75 2.75,-2.13 3.1,-2.13 3.1,2.13 2.75,2.13 2.75,2.75 2.13,2.75 2.13,3.1 -2.13,3.1 -2.13,2.75 -2.75,2.75 -2.75,2.13 -3.1,2.13 -3.1,-2.13
Top Designator:
  text ".Designator" at -3.43,-0.344 h1.52

## TQFN-32-1EP_5x5mm_P0.5mm_EP3.4x3.4mm [mm] "TQFN-32-1EP_5x5mm_P0.5mm_EP3.4x3.4mm"
pads (37):
  round 0.186 smd: 1(-2.438,1.75) 8(-2.438,-1.75) 9(-1.75,-2.438) 16(1.75,-2.438) 17(2.438,-1.75) 24(2.438,1.75) 25(1.75,2.438) 32(-1.75,2.438)
  rrect25% 0.825x0.25 smd: 2(-2.438,1.25) 3(-2.438,0.75) 4(-2.438,0.25) 5(-2.438,-0.25) 6(-2.438,-0.75) 7(-2.438,-1.25) 18(2.438,-1.25) 19(2.438,-0.75) 20(2.438,-0.25) 21(2.438,0.25) 22(2.438,0.75) 23(2.438,1.25)
  rrect25% 0.25x0.825 smd: 10(-1.25,-2.438) 11(-0.75,-2.438) 12(-0.25,-2.438) 13(0.25,-2.438) 14(0.75,-2.438) 15(1.25,-2.438) 26(1.25,2.438) 27(0.75,2.438) 28(0.25,2.438) 29(-0.25,2.438) 30(-0.75,2.438) 31(-1.25,2.438)
  rect 3.4x3.4 smd: 33(0,0)
  rrect18% 1.37x1.37 on Top Paste: Un1(-0.85,0.85) Un2(-0.85,-0.85) Un3(0.85,0.85) Un4(0.85,-0.85)
F.Cu:
  region: -2.088,1.759 -2.088,1.687 -2.788,1.687 -2.788,1.812 -2.141,1.812
  region: -2.088,-1.759 -2.141,-1.812 -2.788,-1.812 -2.788,-1.687 -2.088,-1.687
  region: -1.687,-2.788 -1.812,-2.788 -1.812,-2.141 -1.759,-2.088 -1.687,-2.088
  region: 1.812,-2.141 1.812,-2.788 1.687,-2.788 1.687,-2.088 1.759,-2.088
  region: 2.788,-1.812 2.141,-1.812 2.088,-1.759 2.088,-1.687 2.788,-1.687
  region: 2.788,1.687 2.088,1.687 2.088,1.759 2.141,1.812 2.788,1.812
  region: 1.812,2.141 1.759,2.088 1.687,2.088 1.687,2.788 1.812,2.788
  region: -1.687,2.088 -1.759,2.088 -1.812,2.141 -1.812,2.788 -1.687,2.788
F.SilkS:
  region: -2.61,2.61 -2.85,2.94 -2.37,2.94
  lines w0.254: -2.61,-2.135 -2.61,-2.61 -2.135,-2.61 ; -2.61,2.135 -2.61,2.37 ; -2.31,2.61 -2.135,2.61 ; 2.135,-2.61 2.61,-2.61 2.61,-2.135 ; 2.135,2.61 2.61,2.61 2.61,2.135
F.Paste:
  region: -2.088,1.759 -2.088,1.687 -2.788,1.687 -2.788,1.812 -2.141,1.812
  region: -2.088,-1.759 -2.141,-1.812 -2.788,-1.812 -2.788,-1.687 -2.088,-1.687
  region: -1.687,-2.788 -1.812,-2.788 -1.812,-2.141 -1.759,-2.088 -1.687,-2.088
  region: 1.812,-2.141 1.812,-2.788 1.687,-2.788 1.687,-2.088 1.759,-2.088
  region: 2.788,-1.812 2.141,-1.812 2.088,-1.759 2.088,-1.687 2.788,-1.687
  region: 2.788,1.687 2.088,1.687 2.088,1.759 2.141,1.812 2.788,1.812
  region: 1.812,2.141 1.759,2.088 1.687,2.088 1.687,2.788 1.812,2.788
  region: -1.687,2.088 -1.759,2.088 -1.812,2.141 -1.812,2.788 -1.687,2.788
F.Mask:
  region: -2.088,1.759 -2.088,1.687 -2.788,1.687 -2.788,1.812 -2.141,1.812
  region: -2.088,-1.759 -2.141,-1.812 -2.788,-1.812 -2.788,-1.687 -2.088,-1.687
  region: -1.687,-2.788 -1.812,-2.788 -1.812,-2.141 -1.759,-2.088 -1.687,-2.088
  region: 1.812,-2.141 1.812,-2.788 1.687,-2.788 1.687,-2.088 1.759,-2.088
  region: 2.788,-1.812 2.141,-1.812 2.088,-1.759 2.088,-1.687 2.788,-1.687
  region: 2.788,1.687 2.088,1.687 2.088,1.759 2.141,1.812 2.788,1.812
  region: 1.812,2.141 1.759,2.088 1.687,2.088 1.687,2.788 1.812,2.788
  region: -1.687,2.088 -1.759,2.088 -1.812,2.141 -1.812,2.788 -1.687,2.788
Top Component Center:
  lines w0.127: -0.127,0 0.127,0 -0.127,0 ; 0,-0.127 0,0.127 0,-0.127
Top Assembly:
  region: 2.5,-2.5 -2.5,-2.5 -2.5,1.5 -1.5,2.5 2.5,2.5
Top Courtyard:
  lines w0.254: -3.1,-2.13 -3.1,2.13 -2.75,2.13 -2.75,2.75 -2.13,2.75 -2.13,3.1 2.13,3.1 2.13,2.75 2.75,2.75 2.75,2.13 3.1,2.13 3.1,-2.13 2.75,-2.13 2.75,-2.75 2.13,-2.75 2.13,-3.1 -2.13,-3.1 -2.13,-2.75 -2.75,-2.75 -2.75,-2.13 -3.1,-2.13
Top Designator:
  text ".Designator" at -3.43,-0.344 h1.52

## TQFN-32-1EP_5x5mm_P0.5mm_EP3.4x3.4mm_ThermalVias [mm] "TQFN-32-1EP_5x5mm_P0.5mm_EP3.4x3.4mm_ThermalVias"
pads (47):
  round 0.186 smd: 1(-2.438,1.75) 8(-2.438,-1.75) 9(-1.75,-2.438) 16(1.75,-2.438) 17(2.438,-1.75) 24(2.438,1.75) 25(1.75,2.438) 32(-1.75,2.438)
  rrect25% 0.825x0.25 smd: 2(-2.438,1.25) 3(-2.438,0.75) 4(-2.438,0.25) 5(-2.438,-0.25) 6(-2.438,-0.75) 7(-2.438,-1.25) 18(2.438,-1.25) 19(2.438,-0.75) 20(2.438,-0.25) 21(2.438,0.25) 22(2.438,0.75) 23(2.438,1.25)
  rrect25% 0.25x0.825 smd: 10(-1.25,-2.438) 11(-0.75,-2.438) 12(-0.25,-2.438) 13(0.25,-2.438) 14(0.75,-2.438) 15(1.25,-2.438) 26(1.25,2.438) 27(0.75,2.438) 28(0.25,2.438) 29(-0.25,2.438) 30(-0.75,2.438) 31(-1.25,2.438)
  round 0.5 hole 0.2: 33(-1.45,-1.45) 33(-1.45,0) 33(-1.45,1.45) 33(0,-1.45) 33(0,0) 33(0,1.45) 33(1.45,-1.45) 33(1.45,0) 33(1.45,1.45)
  rect 3.4x3.4 smd: 33(0,0)
  rect 3.4x3.4 smd far side: 33(0,0)
  rrect17% 1.47x1.47 on Top Paste: Un1(-0.85,0.85) Un2(-0.85,-0.85) Un3(0.85,0.85) Un4(0.85,-0.85)
F.Cu:
  region: -2.088,1.759 -2.088,1.687 -2.788,1.687 -2.788,1.812 -2.141,1.812
  region: -2.088,-1.759 -2.141,-1.812 -2.788,-1.812 -2.788,-1.687 -2.088,-1.687
  region: -1.687,-2.788 -1.812,-2.788 -1.812,-2.141 -1.759,-2.088 -1.687,-2.088
  region: 1.812,-2.141 1.812,-2.788 1.687,-2.788 1.687,-2.088 1.759,-2.088
  region: 2.788,-1.812 2.141,-1.812 2.088,-1.759 2.088,-1.687 2.788,-1.687
  region: 2.788,1.687 2.088,1.687 2.088,1.759 2.141,1.812 2.788,1.812
  region: 1.812,2.141 1.759,2.088 1.687,2.088 1.687,2.788 1.812,2.788
  region: -1.687,2.088 -1.759,2.088 -1.812,2.141 -1.812,2.788 -1.687,2.788
F.SilkS:
  region: -2.61,2.61 -2.85,2.94 -2.37,2.94
  lines w0.254: -2.61,-2.135 -2.61,-2.61 -2.135,-2.61 ; -2.61,2.135 -2.61,2.37 ; -2.31,2.61 -2.135,2.61 ; 2.135,-2.61 2.61,-2.61 2.61,-2.135 ; 2.135,2.61 2.61,2.61 2.61,2.135
F.Paste:
  region: -2.088,1.759 -2.088,1.687 -2.788,1.687 -2.788,1.812 -2.141,1.812
  region: -2.088,-1.759 -2.141,-1.812 -2.788,-1.812 -2.788,-1.687 -2.088,-1.687
  region: -1.687,-2.788 -1.812,-2.788 -1.812,-2.141 -1.759,-2.088 -1.687,-2.088
  region: 1.812,-2.141 1.812,-2.788 1.687,-2.788 1.687,-2.088 1.759,-2.088
  region: 2.788,-1.812 2.141,-1.812 2.088,-1.759 2.088,-1.687 2.788,-1.687
  region: 2.788,1.687 2.088,1.687 2.088,1.759 2.141,1.812 2.788,1.812
  region: 1.812,2.141 1.759,2.088 1.687,2.088 1.687,2.788 1.812,2.788
  region: -1.687,2.088 -1.759,2.088 -1.812,2.141 -1.812,2.788 -1.687,2.788
F.Mask:
  region: -2.088,1.759 -2.088,1.687 -2.788,1.687 -2.788,1.812 -2.141,1.812
  region: -2.088,-1.759 -2.141,-1.812 -2.788,-1.812 -2.788,-1.687 -2.088,-1.687
  region: -1.687,-2.788 -1.812,-2.788 -1.812,-2.141 -1.759,-2.088 -1.687,-2.088
  region: 1.812,-2.141 1.812,-2.788 1.687,-2.788 1.687,-2.088 1.759,-2.088
  region: 2.788,-1.812 2.141,-1.812 2.088,-1.759 2.088,-1.687 2.788,-1.687
  region: 2.788,1.687 2.088,1.687 2.088,1.759 2.141,1.812 2.788,1.812
  region: 1.812,2.141 1.759,2.088 1.687,2.088 1.687,2.788 1.812,2.788
  region: -1.687,2.088 -1.759,2.088 -1.812,2.141 -1.812,2.788 -1.687,2.788
Top Component Center:
  lines w0.127: -0.127,0 0.127,0 -0.127,0 ; 0,-0.127 0,0.127 0,-0.127
Top Assembly:
  region: 2.5,-2.5 -2.5,-2.5 -2.5,1.5 -1.5,2.5 2.5,2.5
Top Courtyard:
  lines w0.254: -3.1,-2.13 -3.1,2.13 -2.75,2.13 -2.75,2.75 -2.13,2.75 -2.13,3.1 2.13,3.1 2.13,2.75 2.75,2.75 2.75,2.13 3.1,2.13 3.1,-2.13 2.75,-2.13 2.75,-2.75 2.13,-2.75 2.13,-3.1 -2.13,-3.1 -2.13,-2.75 -2.75,-2.75 -2.75,-2.13 -3.1,-2.13
Top Designator:
  text ".Designator" at -3.43,-0.344 h1.52

## TQFN-40-1EP_5x5mm_P0.4mm_EP3.5x3.5mm [mm] "TQFN-40-1EP_5x5mm_P0.4mm_EP3.5x3.5mm"
pads (45):
  round 0.115 smd: 1(-2.438,1.8) 10(-2.438,-1.8) 11(-1.8,-2.438) 20(1.8,-2.438) 21(2.438,-1.8) 30(2.438,1.8) 31(1.8,2.438) 40(-1.8,2.438)
  rrect25% 0.825x0.2 smd: 2(-2.438,1.4) 3(-2.438,1) 4(-2.438,0.6) 5(-2.438,0.2) 6(-2.438,-0.2) 7(-2.438,-0.6) 8(-2.438,-1) 9(-2.438,-1.4) 22(2.438,-1.4) 23(2.438,-1) 24(2.438,-0.6) 25(2.438,-0.2) 26(2.438,0.2) 27(2.438,0.6) 28(2.438,1) 29(2.438,1.4)
  rrect25% 0.2x0.825 smd: 12(-1.4,-2.438) 13(-1,-2.438) 14(-0.6,-2.438) 15(-0.2,-2.438) 16(0.2,-2.438) 17(0.6,-2.438) 18(1,-2.438) 19(1.4,-2.438) 32(1.4,2.438) 33(1,2.438) 34(0.6,2.438) 35(0.2,2.438) 36(-0.2,2.438) 37(-0.6,2.438) 38(-1,2.438) 39(-1.4,2.438)
  rect 3.5x3.5 smd: 41(0,0)
  rrect18% 1.41x1.41 on Top Paste: Un1(-0.875,0.875) Un2(-0.875,-0.875) Un3(0.875,0.875) Un4(0.875,-0.875)
F.Cu:
  region: -2.065,1.763 -2.065,1.74 -2.81,1.74 -2.81,1.86 -2.162,1.86
  region: -2.065,-1.763 -2.162,-1.86 -2.81,-1.86 -2.81,-1.74 -2.065,-1.74
  region: -1.74,-2.81 -1.86,-2.81 -1.86,-2.162 -1.763,-2.065 -1.74,-2.065
  region: 1.86,-2.162 1.86,-2.81 1.74,-2.81 1.74,-2.065 1.763,-2.065
  region: 2.81,-1.86 2.162,-1.86 2.065,-1.763 2.065,-1.74 2.81,-1.74
  region: 2.81,1.74 2.065,1.74 2.065,1.763 2.162,1.86 2.81,1.86
  region: 1.86,2.162 1.763,2.065 1.74,2.065 1.74,2.81 1.86,2.81
  region: -1.74,2.065 -1.763,2.065 -1.86,2.162 -1.86,2.81 -1.74,2.81
F.SilkS:
  region: -2.61,2.61 -2.85,2.94 -2.37,2.94
  lines w0.254: -2.61,-2.16 -2.61,-2.61 -2.16,-2.61 ; -2.61,2.16 -2.61,2.37 ; -2.31,2.61 -2.16,2.61 ; 2.16,-2.61 2.61,-2.61 2.61,-2.16 ; 2.16,2.61 2.61,2.61 2.61,2.16
F.Paste:
  region: -2.065,1.763 -2.065,1.74 -2.81,1.74 -2.81,1.86 -2.162,1.86
  region: -2.065,-1.763 -2.162,-1.86 -2.81,-1.86 -2.81,-1.74 -2.065,-1.74
  region: -1.74,-2.81 -1.86,-2.81 -1.86,-2.162 -1.763,-2.065 -1.74,-2.065
  region: 1.86,-2.162 1.86,-2.81 1.74,-2.81 1.74,-2.065 1.763,-2.065
  region: 2.81,-1.86 2.162,-1.86 2.065,-1.763 2.065,-1.74 2.81,-1.74
  region: 2.81,1.74 2.065,1.74 2.065,1.763 2.162,1.86 2.81,1.86
  region: 1.86,2.162 1.763,2.065 1.74,2.065 1.74,2.81 1.86,2.81
  region: -1.74,2.065 -1.763,2.065 -1.86,2.162 -1.86,2.81 -1.74,2.81
F.Mask:
  region: -2.065,1.763 -2.065,1.74 -2.81,1.74 -2.81,1.86 -2.162,1.86
  region: -2.065,-1.763 -2.162,-1.86 -2.81,-1.86 -2.81,-1.74 -2.065,-1.74
  region: -1.74,-2.81 -1.86,-2.81 -1.86,-2.162 -1.763,-2.065 -1.74,-2.065
  region: 1.86,-2.162 1.86,-2.81 1.74,-2.81 1.74,-2.065 1.763,-2.065
  region: 2.81,-1.86 2.162,-1.86 2.065,-1.763 2.065,-1.74 2.81,-1.74
  region: 2.81,1.74 2.065,1.74 2.065,1.763 2.162,1.86 2.81,1.86
  region: 1.86,2.162 1.763,2.065 1.74,2.065 1.74,2.81 1.86,2.81
  region: -1.74,2.065 -1.763,2.065 -1.86,2.162 -1.86,2.81 -1.74,2.81
Top Component Center:
  lines w0.127: -0.127,0 0.127,0 -0.127,0 ; 0,-0.127 0,0.127 0,-0.127
Top Assembly:
  region: 2.5,-2.5 -2.5,-2.5 -2.5,1.5 -1.5,2.5 2.5,2.5
Top Courtyard:
  lines w0.254: -3.1,-2.15 -3.1,2.15 -2.75,2.15 -2.75,2.75 -2.15,2.75 -2.15,3.1 2.15,3.1 2.15,2.75 2.75,2.75 2.75,2.15 3.1,2.15 3.1,-2.15 2.75,-2.15 2.75,-2.75 2.15,-2.75 2.15,-3.1 -2.15,-3.1 -2.15,-2.75 -2.75,-2.75 -2.75,-2.15 -3.1,-2.15
Top Designator:
  text ".Designator" at -3.43,-0.344 h1.52
3D body "TQFN-40-1EP_5x5mm_P0.4mm_EP3.5x3.5mm.step": height 0.8, standoff 0, extent -2.5,-2.5 2.5,2.5

## TQFN-40-1EP_5x5mm_P0.4mm_EP3.5x3.5mm_ThermalVias [mm] "TQFN-40-1EP_5x5mm_P0.4mm_EP3.5x3.5mm_ThermalVias"
pads (55):
  round 0.115 smd: 1(-2.438,1.8) 10(-2.438,-1.8) 11(-1.8,-2.438) 20(1.8,-2.438) 21(2.438,-1.8) 30(2.438,1.8) 31(1.8,2.438) 40(-1.8,2.438)
  rrect25% 0.825x0.2 smd: 2(-2.438,1.4) 3(-2.438,1) 4(-2.438,0.6) 5(-2.438,0.2) 6(-2.438,-0.2) 7(-2.438,-0.6) 8(-2.438,-1) 9(-2.438,-1.4) 22(2.438,-1.4) 23(2.438,-1) 24(2.438,-0.6) 25(2.438,-0.2) 26(2.438,0.2) 27(2.438,0.6) 28(2.438,1) 29(2.438,1.4)
  rrect25% 0.2x0.825 smd: 12(-1.4,-2.438) 13(-1,-2.438) 14(-0.6,-2.438) 15(-0.2,-2.438) 16(0.2,-2.438) 17(0.6,-2.438) 18(1,-2.438) 19(1.4,-2.438) 32(1.4,2.438) 33(1,2.438) 34(0.6,2.438) 35(0.2,2.438) 36(-0.2,2.438) 37(-0.6,2.438) 38(-1,2.438) 39(-1.4,2.438)
  round 0.5 hole 0.2: 41(-1.5,-1.5) 41(-1.5,0) 41(-1.5,1.5) 41(0,-1.5) 41(0,0) 41(0,1.5) 41(1.5,-1.5) 41(1.5,0) 41(1.5,1.5)
  rect 3.5x3.5 smd: 41(0,0)
  rect 3.5x3.5 smd far side: 41(0,0)
  rrect16% 1.52x1.52 on Top Paste: Un1(-0.875,0.875) Un2(-0.875,-0.875) Un3(0.875,0.875) Un4(0.875,-0.875)
F.Cu:
  region: -1.74,2.065 -1.763,2.065 -1.86,2.162 -1.86,2.81 -1.74,2.81
  region: 1.86,2.162 1.763,2.065 1.74,2.065 1.74,2.81 1.86,2.81
  region: 2.81,1.74 2.065,1.74 2.065,1.763 2.162,1.86 2.81,1.86
  region: 2.81,-1.86 2.162,-1.86 2.065,-1.763 2.065,-1.74 2.81,-1.74
  region: 1.86,-2.162 1.86,-2.81 1.74,-2.81 1.74,-2.065 1.763,-2.065
  region: -1.74,-2.81 -1.86,-2.81 -1.86,-2.162 -1.763,-2.065 -1.74,-2.065
  region: -2.065,-1.763 -2.162,-1.86 -2.81,-1.86 -2.81,-1.74 -2.065,-1.74
  region: -2.065,1.763 -2.065,1.74 -2.81,1.74 -2.81,1.86 -2.162,1.86
F.SilkS:
  region: -2.61,2.61 -2.85,2.94 -2.37,2.94
  lines w0.254: -2.61,-2.16 -2.61,-2.61 -2.16,-2.61 ; -2.61,2.16 -2.61,2.37 ; -2.31,2.61 -2.16,2.61 ; 2.16,-2.61 2.61,-2.61 2.61,-2.16 ; 2.16,2.61 2.61,2.61 2.61,2.16
F.Paste:
  region: -1.74,2.065 -1.763,2.065 -1.86,2.162 -1.86,2.81 -1.74,2.81
  region: 1.86,2.162 1.763,2.065 1.74,2.065 1.74,2.81 1.86,2.81
  region: 2.81,1.74 2.065,1.74 2.065,1.763 2.162,1.86 2.81,1.86
  region: 2.81,-1.86 2.162,-1.86 2.065,-1.763 2.065,-1.74 2.81,-1.74
  region: 1.86,-2.162 1.86,-2.81 1.74,-2.81 1.74,-2.065 1.763,-2.065
  region: -1.74,-2.81 -1.86,-2.81 -1.86,-2.162 -1.763,-2.065 -1.74,-2.065
  region: -2.065,-1.763 -2.162,-1.86 -2.81,-1.86 -2.81,-1.74 -2.065,-1.74
  region: -2.065,1.763 -2.065,1.74 -2.81,1.74 -2.81,1.86 -2.162,1.86
F.Mask:
  region: -1.74,2.065 -1.763,2.065 -1.86,2.162 -1.86,2.81 -1.74,2.81
  region: 1.86,2.162 1.763,2.065 1.74,2.065 1.74,2.81 1.86,2.81
  region: 2.81,1.74 2.065,1.74 2.065,1.763 2.162,1.86 2.81,1.86
  region: 2.81,-1.86 2.162,-1.86 2.065,-1.763 2.065,-1.74 2.81,-1.74
  region: 1.86,-2.162 1.86,-2.81 1.74,-2.81 1.74,-2.065 1.763,-2.065
  region: -1.74,-2.81 -1.86,-2.81 -1.86,-2.162 -1.763,-2.065 -1.74,-2.065
  region: -2.065,-1.763 -2.162,-1.86 -2.81,-1.86 -2.81,-1.74 -2.065,-1.74
  region: -2.065,1.763 -2.065,1.74 -2.81,1.74 -2.81,1.86 -2.162,1.86
Top Component Center:
  lines w0.127: -0.127,0 0.127,0 -0.127,0 ; 0,-0.127 0,0.127 0,-0.127
Top Assembly:
  region: 2.5,-2.5 -2.5,-2.5 -2.5,1.5 -1.5,2.5 2.5,2.5
Top Courtyard:
  lines w0.254: -3.1,-2.15 -2.75,-2.15 -2.75,-2.75 -2.15,-2.75 -2.15,-3.1 2.15,-3.1 2.15,-2.75 2.75,-2.75 2.75,-2.15 3.1,-2.15 3.1,2.15 2.75,2.15 2.75,2.75 2.15,2.75 2.15,3.1 -2.15,3.1 -2.15,2.75 -2.75,2.75 -2.75,2.15 -3.1,2.15 -3.1,-2.15
Top Designator:
  text ".Designator" at -3.43,-0.344 h1.52
3D body "TQFN-40-1EP_5x5mm_P0.4mm_EP3.5x3.5mm.step": height 0.8, standoff 0, extent -2.5,-2.5 2.5,2.5

## TQFN-44-1EP_7x7mm_P0.5mm_EP4.7x4.7mm [mm] "TQFN-44-1EP_7x7mm_P0.5mm_EP4.7x4.7mm"
pads (54):
  rrect25% 1.025x0.25 smd: 1(-3.363,2.5) 2(-3.363,2) 3(-3.363,1.5) 4(-3.363,1) 5(-3.363,0.5) 6(-3.363,0) 7(-3.363,-0.5) 8(-3.363,-1) 9(-3.363,-1.5) 10(-3.363,-2) 11(-3.363,-2.5) 23(3.363,-2.5) 24(3.363,-2) 25(3.363,-1.5) 26(3.363,-1) 27(3.363,-0.5) 28(3.363,0) 29(3.363,0.5) 30(3.363,1) 31(3.363,1.5) 32(3.363,2) 33(3.363,2.5)
  rrect25% 0.25x1.025 smd: 12(-2.5,-3.363) 13(-2,-3.363) 14(-1.5,-3.363) 15(-1,-3.363) 16(-0.5,-3.363) 17(0,-3.363) 18(0.5,-3.363) 19(1,-3.363) 20(1.5,-3.363) 21(2,-3.363) 22(2.5,-3.363) 34(2.5,3.363) 35(2,3.363) 36(1.5,3.363) 37(1,3.363) 38(0.5,3.363) 39(0,3.363) 40(-0.5,3.363) 41(-1,3.363) 42(-1.5,3.363) 43(-2,3.363) 44(-2.5,3.363)
  rect 4.7x4.7 smd: 45(0,0)
  rrect20% 1.26x1.26 on Top Paste: Un1(-1.57,1.57) Un2(-1.57,0) Un3(-1.57,-1.57) Un4(0,1.57) Un5(0,0) Un6(0,-1.57) Un7(1.57,1.57) Un8(1.57,0) Un9(1.57,-1.57)
F.SilkS:
  region: -3.61,3.61 -3.85,3.94 -3.37,3.94
  lines w0.254: -3.61,-2.885 -3.61,-3.61 -2.885,-3.61 ; -3.61,2.885 -3.61,3.37 ; -3.31,3.61 -2.885,3.61 ; 2.885,-3.61 3.61,-3.61 3.61,-2.885 ; 2.885,3.61 3.61,3.61 3.61,2.885
Top Component Center:
  lines w0.127: -0.127,0 0.127,0 -0.127,0 ; 0,-0.127 0,0.127 0,-0.127
Top Assembly:
  region: 3.5,-3.5 -3.5,-3.5 -3.5,2.5 -2.5,3.5 3.5,3.5
Top Courtyard:
  lines w0.254: -4.13,-2.88 -3.75,-2.88 -3.75,-3.75 -2.88,-3.75 -2.88,-4.13 2.88,-4.13 2.88,-3.75 3.75,-3.75 3.75,-2.88 4.13,-2.88 4.13,2.88 3.75,2.88 3.75,3.75 2.88,3.75 2.88,4.13 -2.88,4.13 -2.88,3.75 -3.75,3.75 -3.75,2.88 -4.13,2.88 -4.13,-2.88
Top Designator:
  text ".Designator" at -3.43,-0.344 h1.52
3D body "TQFN-44-1EP_7x7mm_P0.5mm_EP4.7x4.7mm.step": height 0.75, standoff 0, extent -3.5,-3.5 3.5,3.5

## TQFN-44-1EP_7x7mm_P0.5mm_EP4.7x4.7mm_ThermalVias [mm] "TQFN-44-1EP_7x7mm_P0.5mm_EP4.7x4.7mm_ThermalVias"
pads (71):
  rrect25% 1.025x0.25 smd: 1(-3.363,2.5) 2(-3.363,2) 3(-3.363,1.5) 4(-3.363,1) 5(-3.363,0.5) 6(-3.363,0) 7(-3.363,-0.5) 8(-3.363,-1) 9(-3.363,-1.5) 10(-3.363,-2) 11(-3.363,-2.5) 23(3.363,-2.5) 24(3.363,-2) 25(3.363,-1.5) 26(3.363,-1) 27(3.363,-0.5) 28(3.363,0) 29(3.363,0.5) 30(3.363,1) 31(3.363,1.5) 32(3.363,2) 33(3.363,2.5)
  rrect25% 0.25x1.025 smd: 12(-2.5,-3.363) 13(-2,-3.363) 14(-1.5,-3.363) 15(-1,-3.363) 16(-0.5,-3.363) 17(0,-3.363) 18(0.5,-3.363) 19(1,-3.363) 20(1.5,-3.363) 21(2,-3.363) 22(2.5,-3.363) 34(2.5,3.363) 35(2,3.363) 36(1.5,3.363) 37(1,3.363) 38(0.5,3.363) 39(0,3.363) 40(-0.5,3.363) 41(-1,3.363) 42(-1.5,3.363) 43(-2,3.363) 44(-2.5,3.363)
  round 0.5 hole 0.2: 45(-2.1,-2.1) 45(-2.1,-0.7) 45(-2.1,0.7) 45(-2.1,2.1) 45(-0.7,-2.1) 45(-0.7,-0.7) 45(-0.7,0.7) 45(-0.7,2.1) 45(0.7,-2.1) 45(0.7,-0.7) 45(0.7,0.7) 45(0.7,2.1) 45(2.1,-2.1) 45(2.1,-0.7) 45(2.1,0.7) 45(2.1,2.1)
  rect 4.7x4.7 smd: 45(0,0)
  rect 4.7x4.7 smd far side: 45(0,0)
  rrect18% 1.36x1.36 on Top Paste: Un1(-1.57,1.57) Un2(-1.57,0) Un3(-1.57,-1.57) Un4(0,1.57) Un5(0,0) Un6(0,-1.57) Un7(1.57,1.57) Un8(1.57,0) Un9(1.57,-1.57)
F.SilkS:
  region: -3.61,3.61 -3.85,3.94 -3.37,3.94
  lines w0.254: -3.61,-2.885 -3.61,-3.61 -2.885,-3.61 ; -3.61,2.885 -3.61,3.37 ; -3.31,3.61 -2.885,3.61 ; 2.885,-3.61 3.61,-3.61 3.61,-2.885 ; 2.885,3.61 3.61,3.61 3.61,2.885
Top Component Center:
  lines w0.127: -0.127,0 0.127,0 -0.127,0 ; 0,-0.127 0,0.127 0,-0.127
Top Assembly:
  region: 3.5,-3.5 -3.5,-3.5 -3.5,2.5 -2.5,3.5 3.5,3.5
Top Courtyard:
  lines w0.254: -4.13,-2.88 -3.75,-2.88 -3.75,-3.75 -2.88,-3.75 -2.88,-4.13 2.88,-4.13 2.88,-3.75 3.75,-3.75 3.75,-2.88 4.13,-2.88 4.13,2.88 3.75,2.88 3.75,3.75 2.88,3.75 2.88,4.13 -2.88,4.13 -2.88,3.75 -3.75,3.75 -3.75,2.88 -4.13,2.88 -4.13,-2.88
Top Designator:
  text ".Designator" at -3.43,-0.344 h1.52
3D body "TQFN-44-1EP_7x7mm_P0.5mm_EP4.7x4.7mm.step": height 0.75, standoff 0, extent -3.5,-3.5 3.5,3.5

## TQFN-48-1EP_7x7mm_P0.5mm_EP5.1x5.1mm [mm] "TQFN-48-1EP_7x7mm_P0.5mm_EP5.1x5.1mm"
pads (58):
  rrect25% 0.875x0.25 smd: 1(-3.437,2.75) 2(-3.437,2.25) 3(-3.437,1.75) 4(-3.437,1.25) 5(-3.437,0.75) 6(-3.437,0.25) 7(-3.437,-0.25) 8(-3.437,-0.75) 9(-3.437,-1.25) 10(-3.437,-1.75) 11(-3.437,-2.25) 12(-3.437,-2.75) 25(3.437,-2.75) 26(3.437,-2.25) 27(3.437,-1.75) 28(3.437,-1.25) 29(3.437,-0.75) 30(3.437,-0.25) 31(3.437,0.25) 32(3.437,0.75) 33(3.437,1.25) 34(3.437,1.75) 35(3.437,2.25) 36(3.437,2.75)
  rrect25% 0.25x0.875 smd: 13(-2.75,-3.437) 14(-2.25,-3.437) 15(-1.75,-3.437) 16(-1.25,-3.437) 17(-0.75,-3.437) 18(-0.25,-3.437) 19(0.25,-3.437) 20(0.75,-3.437) 21(1.25,-3.437) 22(1.75,-3.437) 23(2.25,-3.437) 24(2.75,-3.437) 37(2.75,3.437) 38(2.25,3.437) 39(1.75,3.437) 40(1.25,3.437) 41(0.75,3.437) 42(0.25,3.437) 43(-0.25,3.437) 44(-0.75,3.437) 45(-1.25,3.437) 46(-1.75,3.437) 47(-2.25,3.437) 48(-2.75,3.437)
  rect 5.1x5.1 smd: 49(0,0)
  rrect18% 1.37x1.37 on Top Paste: Un1(-1.7,1.7) Un2(-1.7,0) Un3(-1.7,-1.7) Un4(0,1.7) Un5(0,0) Un6(0,-1.7) Un7(1.7,1.7) Un8(1.7,0) Un9(1.7,-1.7)
F.SilkS:
  region: -3.61,3.61 -3.85,3.94 -3.37,3.94
  lines w0.254: -3.61,-3.135 -3.61,-3.61 -3.135,-3.61 ; -3.61,3.135 -3.61,3.37 ; -3.31,3.61 -3.135,3.61 ; 3.135,-3.61 3.61,-3.61 3.61,-3.135 ; 3.135,3.61 3.61,3.61 3.61,3.135
Top Component Center:
  lines w0.127: -0.127,0 0.127,0 -0.127,0 ; 0,-0.127 0,0.127 0,-0.127
Top Assembly:
  region: 3.5,-3.5 -3.5,-3.5 -3.5,2.5 -2.5,3.5 3.5,3.5
Top Courtyard:
  lines w0.254: -4.13,-3.13 -3.75,-3.13 -3.75,-3.75 -3.13,-3.75 -3.13,-4.13 3.13,-4.13 3.13,-3.75 3.75,-3.75 3.75,-3.13 4.13,-3.13 4.13,3.13 3.75,3.13 3.75,3.75 3.13,3.75 3.13,4.13 -3.13,4.13 -3.13,3.75 -3.75,3.75 -3.75,3.13 -4.13,3.13 -4.13,-3.13
Top Designator:
  text ".Designator" at -3.43,-0.344 h1.52
3D body "TQFN-48-1EP_7x7mm_P0.5mm_EP5.1x5.1mm.step": height 0.75, standoff 0, extent -3.5,-3.5 3.5,3.5